# Altium schematic symbol library Brusless Motor.SchLib: 2 symbols
Pins are listed as number, name and electrical type; pins without a type are passive.

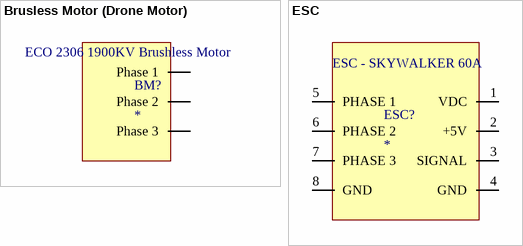
[diagram p0: symbols Brusless Motor (Drone Motor) to ESC]

## Brusless Motor (Drone Motor)
designator BM?
ECO 2306 1900KV Brushless Motor
pins: 0 Phase 1, 1 Phase 2, 2 Phase 3

## ESC
designator ESC?
SkyWalker 60A
pins: 1 VDC, 2 +5V, 3 SIGNAL, 4 GND, 5 PHASE 1, 6 PHASE 2, 7 PHASE 3, 8 GND
text: ESC - SKYWALKER 60A